# Altium footprint library Connector_SMD.PcbLib: 116 footprints (part 5 of 8)
Each footprint in its own frame and in the unit in brackets; x right, y up, seen from the top. Pads: shape width x height; smd on the part's side, far side on the other; paste and mask are expansions set on the pad; w line width, h text height; cw(c..) or ccw(c..) is an arc to the next point about the centre after c.
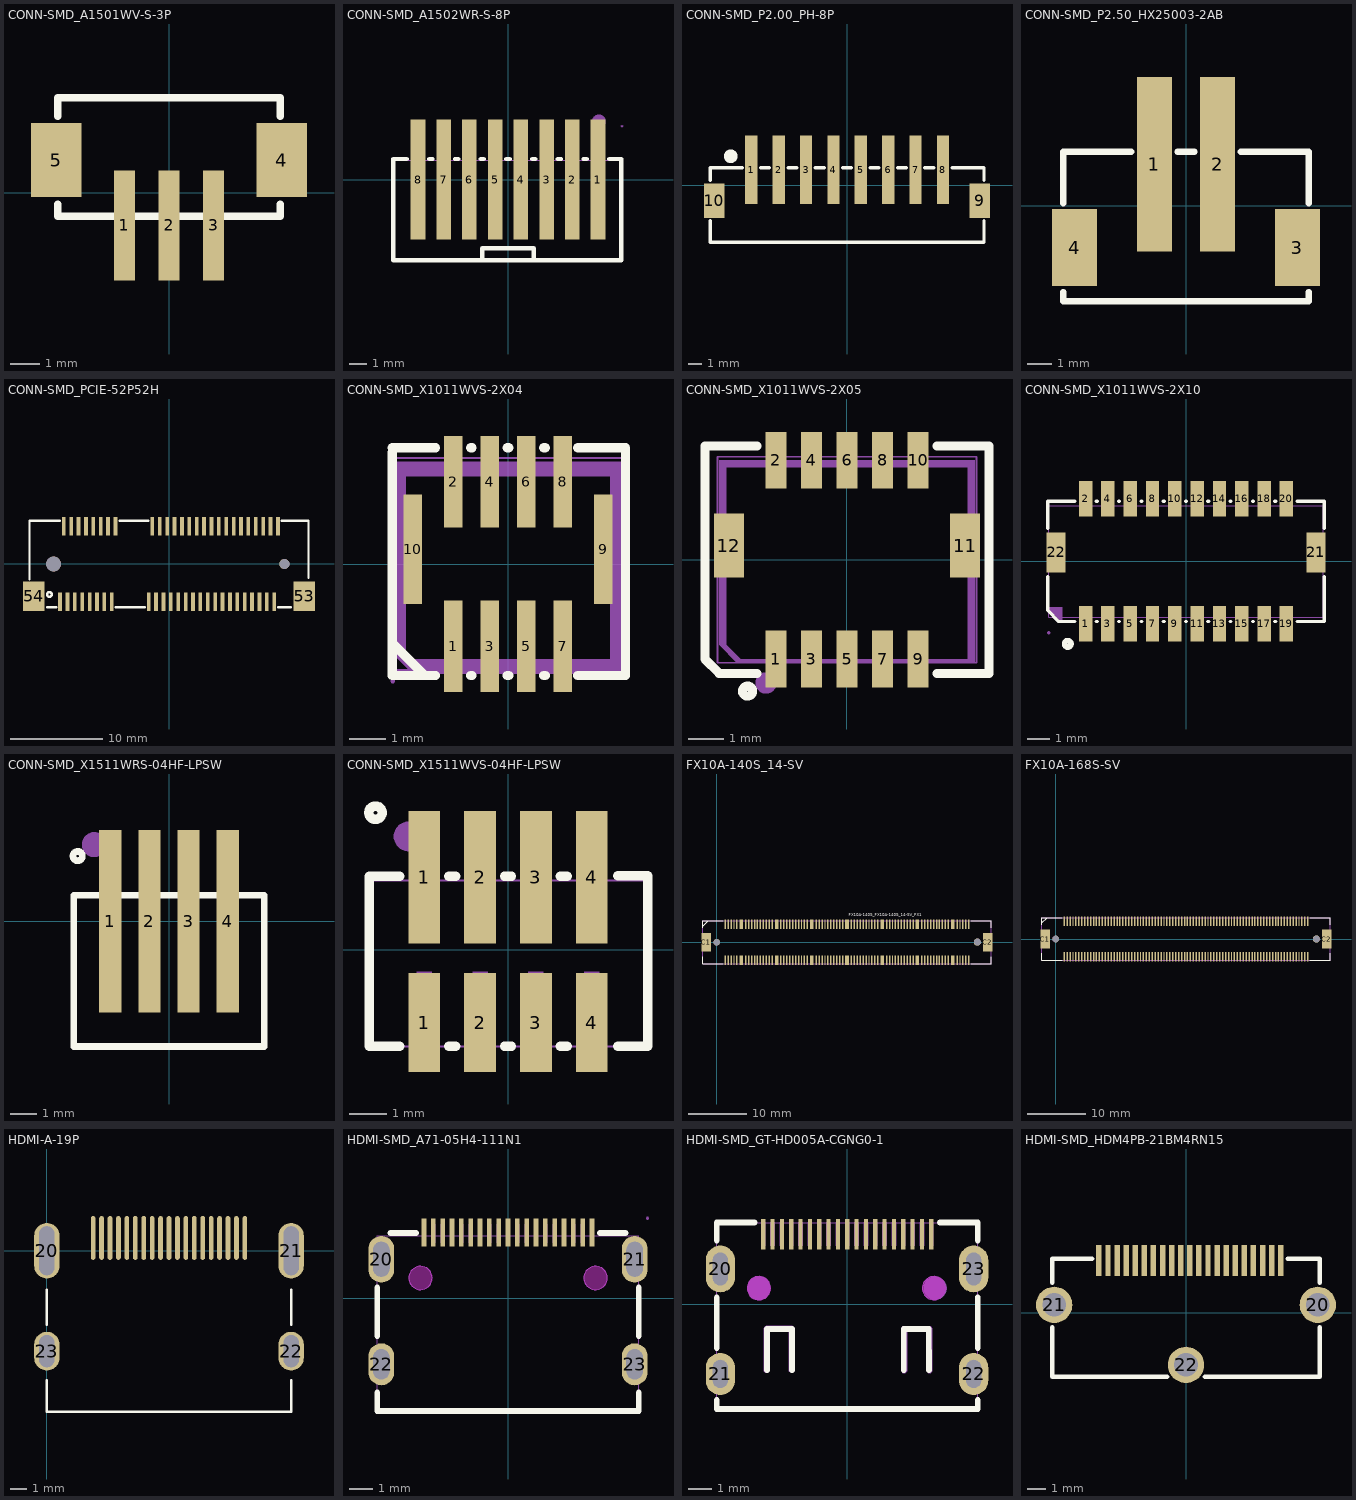
[diagram p4: the footprints below, top view; thin cyan lines are the x and y axes]

## CONN-SMD_A1501WV-S-3P [mm]
pads (5):
  rect 0.7x3.7 smd: 1(-1.5,-1.1) 2(0,-1.1) 3(1.5,-1.1)
  rect 1.7x2.5 smd: 4(3.8,1.1) 5(-3.8,1.1)
Top Overlay:
  lines w0.254: -3.75,-0.381 -3.75,-0.8 3.75,-0.8 3.75,-0.381 ; -3.75,2.581 -3.75,3.2 3.75,3.2 3.75,2.581
3D body "CN1.stp": height 5.05, standoff 0, extent -3.749,-2.198 3.75,3.001

## CONN-SMD_A1502WR-S-8P [mm]
pads (8):
  rect 0.85x7 smd paste+0 mask+0.051: 1(5.25,0) 2(3.75,0) 3(2.25,0) 4(0.75,0) 5(-0.75,0) 6(-2.25,0) 7(-3.75,0) 8(-5.25,0)
Top Overlay:
  lines w0.254: -6.7,1.1 -6.7,-4.7 6.6,-4.7 6.6,1.2 5.906,1.2 ; -6.7,1.2 -5.906,1.2 ; -4.594,1.2 -4.406,1.2 ; -3.094,1.2 -2.906,1.2 ; -1.594,1.2 -1.406,1.2 ; -1.5,-4.675 -1.5,-4 1.5,-4 1.5,-4.675 ; -0.094,1.2 0.094,1.2 ; 1.406,1.2 1.594,1.2 ; 2.906,1.2 3.094,1.2 ; 4.406,1.2 4.594,1.2
Mechanical 6:
  circle w0.4: c5.3,3.4 r0.2
Mechanical 15:
  region: 6.71,3.122 6.71,3.147 6.675,3.182 6.625,3.182 6.59,3.147 6.59,3.122 6.59,3.098 6.625,3.062 6.675,3.062 6.71,3.098 6.71,3.122
  region: -5.475,3.122 -5.025,3.122 -5.025,-2.878 -5.475,-2.878
  region: -3.975,3.122 -3.525,3.122 -3.525,-2.878 -3.975,-2.878
  region: -2.475,3.122 -2.025,3.122 -2.025,-2.878 -2.475,-2.878
  region: -0.975,3.122 -0.525,3.122 -0.525,-2.878 -0.975,-2.878
  region: 0.525,3.122 0.975,3.122 0.975,-2.878 0.525,-2.878
  region: 2.025,3.122 2.475,3.122 2.475,-2.878 2.025,-2.878
  region: 3.525,3.122 3.975,3.122 3.975,-2.878 3.525,-2.878
  region: 5.025,3.122 5.475,3.122 5.475,-2.878 5.025,-2.878
  lines w0.051: -6.65,-4.628 -6.65,1.122 6.65,1.122 6.65,-4.628 -6.65,-4.628
3D body "CN1.stp": height 4.46, standoff 0, extent -6.65,-4.625 6.65,3.125

## CONN-SMD_P2.00_PH-8P [mm]
pads (10):
  rect 0.9x5 smd: 1(-6.99,1.128) 2(-4.99,1.128) 3(-2.99,1.128) 4(-0.99,1.128) 5(1.01,1.128) 6(3.01,1.128) 7(5.01,1.128) 8(7.01,1.128)
  rect 1.5x2.5 smd: 9(9.71,-1.127) 10(-9.71,-1.127)
Top Overlay:
  circle w0.5: c-8.5,2.123 r0.25
  lines w0.254: -9.99,-2.604 -9.99,-4.167 9.98,-4.167 ; -9.99,0.354 -9.99,1.29 -7.671,1.29 ; -6.309,1.29 -5.671,1.29 ; -4.309,1.29 -3.671,1.29 ; -2.309,1.29 -1.671,1.29 ; -0.309,1.29 0.329,1.29 ; 1.691,1.29 2.329,1.29 ; 3.691,1.29 4.329,1.29 ; 5.691,1.29 6.329,1.29 ; 7.691,1.29 10.01,1.29 10.01,0.354 ; 10.01,-4.167 10.01,-2.604
Mechanical 15:
  circle w0.4: c-6.98,2.283 r0.2
3D body "CN1.stp": height 6.6, standoff 0, extent -10,-4.09 10,2.81

## CONN-SMD_P2.50_HX25003-2AB [mm]
pads (4):
  rect 1.4x7 smd: 1(-1.27,1.675) 2(1.27,1.675)
  rect 1.8x3.1 smd: 3(4.47,-1.675) 4(-4.47,-1.675)
Top Overlay:
  lines w0.254: -4.92,-3.825 4.92,-3.825 4.92,-3.456 ; -4.92,-3.782 -4.92,-3.456 ; -4.92,0.106 -4.92,2.175 -2.201,2.175 ; -0.339,2.175 0.339,2.175 ; 2.201,2.175 4.92,2.175 4.92,0.106

## CONN-SMD_PCIE-52P52H [mm]
pads (56):
  rect 0.4x2 smd: 1(-11.8,-4.1) 2(-11.4,4.1) 3(-11,-4.1) 4(-10.6,4.1) 5(-10.2,-4.1) 6(-9.8,4.1) 7(-9.4,-4.1) 8(-9,4.1) 9(-8.6,-4.1) 10(-8.2,4.1) 11(-7.8,-4.1) 12(-7.4,4.1) 13(-7,-4.1) 14(-6.6,4.1) 15(-6.2,-4.1) 16(-5.8,4.1) 17(-2.2,-4.1) 18(-1.8,4.1) 19(-1.4,-4.1) 20(-1,4.1) 21(-0.6,-4.1) 22(-0.2,4.1) 23(0.2,-4.1) 24(0.6,4.1) 25(1,-4.1) 26(1.4,4.1) 27(1.8,-4.1) 28(2.2,4.1) 29(2.6,-4.1) 30(3,4.1) 31(3.4,-4.1) 32(3.8,4.1) 33(4.2,-4.1) 34(4.6,4.1) 35(5,-4.1) 36(5.4,4.1) 37(5.8,-4.1) 38(6.2,4.1) 39(6.6,-4.1) 40(7,4.1) 41(7.4,-4.1) 42(7.8,4.1) 43(8.2,-4.1) 44(8.6,4.1) 45(9,-4.1) 46(9.4,4.1) 47(9.8,-4.1) 48(10.2,4.1) 49(10.6,-4.1) 50(11,4.1) 51(11.4,-4.1) 52(11.8,4.1)
  rect 2.3x3.2 smd: 53(14.65,-3.5) 54(-14.65,-3.5)
  round 1.6 hole 1.6 unplated: ""(-12.5,0)
  round 1.1 hole 1.1 unplated: ""(12.5,0)
Top Overlay:
  circle w0.254: c-12.954,-3.302 r0.254
  lines w0.254: -15.113,-1.651 -15.113,4.699 -11.831,4.699 ; -13.208,-4.699 -12.231,-4.699 ; -5.769,-4.699 -2.631,-4.699 ; -5.369,4.699 -2.231,4.699 ; 11.831,-4.699 13.208,-4.699 ; 12.231,4.699 15.113,4.699 15.113,-1.524

## CONN-SMD_X1011WVS-2X04 [mm]
pads (10):
  rect 0.5x2.5 smd paste+0 mask+0.051: 1(-1.5,-2.25) 2(-1.5,2.25) 3(-0.5,-2.25) 4(-0.5,2.25) 5(0.5,-2.25) 6(0.5,2.25) 7(1.5,-2.25) 8(1.5,2.25)
  rect 0.5x3 smd paste+0 mask+0.051: 9(2.6,0.4) 10(-2.6,0.4)
Top Overlay:
  lines w0.254: -3.16,-2.061 -3.16,-2.162 -2.274,-3.048 ; -3.16,3.048 -3.16,-3.048 -1.981,-3.048 ; -3.16,3.175 -1.981,3.175 ; -1.019,-3.048 -0.981,-3.048 ; -1.019,3.175 -0.981,3.175 ; -0.019,-3.048 0.019,-3.048 ; -0.019,3.175 0.019,3.175 ; 0.981,-3.048 1.019,-3.048 ; 0.981,3.175 1.019,3.175 ; 1.905,-3.048 3.211,-3.048 3.211,3.175 1.905,3.175
Mechanical 6:
  region: -3.2,-2.4 -3.2,2.8 -2.8,2.8 -2.8,-2.4
  region: -3.2,-2.4 -2.6,-3 -2.2,-3 -2.8,-2.4
  region: -2.8,2.8 3.2,2.8 3.2,2.4 -2.8,2.4
  region: 3.2,2.4 3.2,-3 2.8,-3 2.8,2.4
  region: 2.8,-3 -2.6,-3 -2.6,-2.6 2.8,-2.6
Mechanical 15:
  region: -3.09,-3.2 -3.09,-3.175 -3.125,-3.14 -3.175,-3.14 -3.21,-3.175 -3.21,-3.2 -3.21,-3.225 -3.175,-3.26 -3.125,-3.26 -3.09,-3.225 -3.09,-3.2
  region: -1.6,-1.7 -1.4,-1.7 -1.4,-3.2 -1.6,-3.2
  region: -1.6,3.2 -1.4,3.2 -1.4,1.7 -1.6,1.7
  region: -0.6,-1.7 -0.4,-1.7 -0.4,-3.2 -0.6,-3.2
  region: -0.6,3.2 -0.4,3.2 -0.4,1.7 -0.6,1.7
  region: 0.4,-1.7 0.6,-1.7 0.6,-3.2 0.4,-3.2
  region: 0.4,3.2 0.6,3.2 0.6,1.7 0.4,1.7
  region: 1.4,-1.7 1.6,-1.7 1.6,-3.2 1.4,-3.2
  region: 1.4,3.2 1.6,3.2 1.6,1.7 1.4,1.7
  region: -2.7,1.15 -2.5,1.15 -2.5,-0.35 -2.7,-0.35
  region: 2.5,1.15 2.7,1.15 2.7,-0.35 2.5,-0.35
  lines w0.051: -3.15,-2.9 -3.15,2.9 3.15,2.9 3.15,-2.9 -3.15,-2.9
3D body "CN2.stp": height 4.35, standoff 0, extent -3.15,-3.2 3.15,3.2

## CONN-SMD_X1011WVS-2X05 [mm]
pads (12):
  rect 0.6x1.6 smd paste+0 mask+0.051: 1(-2,-2.8) 2(-2,2.8) 3(-1,-2.8) 4(-1,2.8) 5(0,-2.8) 6(0,2.8) 7(1,-2.8) 8(1,2.8) 9(2,-2.8) 10(2,2.8)
  rect 0.85x1.8 smd paste+0 mask+0.051: 11(3.325,0.4) 12(-3.325,0.4)
Top Overlay:
  circle w0.254: c-2.8,-3.7 r0.141
  lines w0.254: -2.531,-3.2 -3.6,-3.2 -4,-2.8 -4,3.2 -2.531,3.2 ; 2.531,-3.2 4,-3.2 4,3.2 2.531,3.2
Mechanical 6:
  circle w0.3: c-2.282,-3.471 r0.15
  region: -3.4,2.8 3.4,2.8 3.4,2.6 -3.4,2.6
  region: 3.6,2.8 3.4,2.8 3.4,-2.4 3.6,-2.4
  region: -3.6,-2.4 -3.6,2.8 -3.4,2.8 -3.4,-2.4
  region: 3.6,-2.8 3.6,-2.4 3.4,-2.4 3.4,-2.8
  region: -3.2,-2.8 3.6,-2.8 3.6,-2.9 -3,-2.9 -3.1,-2.9
  region: -3.5,-2.4 -3.4,-2.4 -2.9,-2.9 -3,-2.9 -3.1,-2.9 -3.6,-2.4
Mechanical 15:
  region: 3.2,0.9 3.4,0.9 3.4,-0.1 3.2,-0.1
  region: -3.4,0.9 -3.2,0.9 -3.2,-0.1 -3.4,-0.1
  region: -2.1,-2.2 -1.9,-2.2 -1.9,-3.2 -2.1,-3.2
  region: -2.1,3.2 -1.9,3.2 -1.9,2.2 -2.1,2.2
  region: -1.1,-2.2 -0.9,-2.2 -0.9,-3.2 -1.1,-3.2
  region: -1.1,3.2 -0.9,3.2 -0.9,2.2 -1.1,2.2
  region: -0.1,-2.2 0.1,-2.2 0.1,-3.2 -0.1,-3.2
  region: -0.1,3.2 0.1,3.2 0.1,2.2 -0.1,2.2
  region: 0.9,-2.2 1.1,-2.2 1.1,-3.2 0.9,-3.2
  region: 0.9,3.2 1.1,3.2 1.1,2.2 0.9,2.2
  region: 1.9,-2.2 2.1,-2.2 2.1,-3.2 1.9,-3.2
  region: 1.9,3.2 2.1,3.2 2.1,2.2 1.9,2.2
  region: -3.59,-3.2 -3.59,-3.175 -3.625,-3.14 -3.675,-3.14 -3.71,-3.175 -3.71,-3.2 -3.71,-3.225 -3.675,-3.26 -3.625,-3.26 -3.59,-3.225 -3.59,-3.2
  lines w0.051: -3.65,-2.9 3.65,-2.9 3.65,2.9 -3.65,2.9 -3.65,-2.9
3D body "CN1.stp": height 4.35, standoff 0, extent -3.65,-3.2 3.65,3.2

## CONN-SMD_X1011WVS-2X10 [mm]
pads (22):
  rect 0.6x1.6 smd paste+0 mask+0.051: 1(-4.5,-2.8) 2(-4.5,2.8) 3(-3.5,-2.8) 4(-3.5,2.8) 5(-2.5,-2.8) 6(-2.5,2.8) 7(-1.5,-2.8) 8(-1.5,2.8) 9(-0.5,-2.8) 10(-0.5,2.8) 11(0.5,-2.8) 12(0.5,2.8) 13(1.5,-2.8) 14(1.5,2.8) 15(2.5,-2.8) 16(2.5,2.8) 17(3.5,-2.8) 18(3.5,2.8) 19(4.5,-2.8) 20(4.5,2.8)
  rect 0.85x1.8 smd paste+0 mask+0.051: 21(5.825,0.4) 22(-5.825,0.4)
Top Overlay:
  circle w0.254: c-5.3,-3.7 r0.141
  lines w0.152: -6.2,-0.68 -6.2,-2.2 -5.7,-2.7 -4.98,-2.7 ; -6.2,1.48 -6.2,2.7 -4.98,2.7 ; -4.02,-2.7 -3.98,-2.7 ; -4.02,2.7 -3.98,2.7 ; -3.02,-2.7 -2.98,-2.7 ; -3.02,2.7 -2.98,2.7 ; -2.02,-2.7 -1.98,-2.7 ; -2.02,2.7 -1.98,2.7 ; -1.02,-2.7 -0.98,-2.7 ; -1.02,2.7 -0.98,2.7 ; -0.02,-2.7 0.02,-2.7 ; -0.02,2.7 0.02,2.7 ; 0.98,-2.7 1.02,-2.7 ; 0.98,2.7 1.02,2.7 ; 1.98,-2.7 2.02,-2.7 ; 1.98,2.7 2.02,2.7 ; 2.98,-2.7 3.02,-2.7 ; 2.98,2.7 3.02,2.7 ; 3.98,-2.7 4.02,-2.7 ; 3.98,2.7 4.02,2.7 ; 4.98,-2.7 6.2,-2.7 6.2,-0.68 ; 4.98,2.7 6.2,2.7 6.2,1.48
Mechanical 6:
  region: -5.55,-2.75 -6.25,-2.05 -5.55,-2.05 -5.55,-2.75
Mechanical 15:
  region: -6.09,-3.2 -6.09,-3.175 -6.125,-3.14 -6.175,-3.14 -6.21,-3.175 -6.21,-3.2 -6.21,-3.225 -6.175,-3.26 -6.125,-3.26 -6.09,-3.225 -6.09,-3.2
  region: 4.4,3.2 4.6,3.2 4.6,2.2 4.4,2.2
  region: 4.4,-2.2 4.6,-2.2 4.6,-3.2 4.4,-3.2
  region: 3.4,3.2 3.6,3.2 3.6,2.2 3.4,2.2
  region: 3.4,-2.2 3.6,-2.2 3.6,-3.2 3.4,-3.2
  region: 2.4,3.2 2.6,3.2 2.6,2.2 2.4,2.2
  region: 2.4,-2.2 2.6,-2.2 2.6,-3.2 2.4,-3.2
  region: 1.4,3.2 1.6,3.2 1.6,2.2 1.4,2.2
  region: 1.4,-2.2 1.6,-2.2 1.6,-3.2 1.4,-3.2
  region: 0.4,3.2 0.6,3.2 0.6,2.2 0.4,2.2
  region: 0.4,-2.2 0.6,-2.2 0.6,-3.2 0.4,-3.2
  region: -0.6,3.2 -0.4,3.2 -0.4,2.2 -0.6,2.2
  region: -0.6,-2.2 -0.4,-2.2 -0.4,-3.2 -0.6,-3.2
  region: -1.6,3.2 -1.4,3.2 -1.4,2.2 -1.6,2.2
  region: -1.6,-2.2 -1.4,-2.2 -1.4,-3.2 -1.6,-3.2
  region: -2.6,3.2 -2.4,3.2 -2.4,2.2 -2.6,2.2
  region: -2.6,-2.2 -2.4,-2.2 -2.4,-3.2 -2.6,-3.2
  region: -3.6,3.2 -3.4,3.2 -3.4,2.2 -3.6,2.2
  region: -3.6,-2.2 -3.4,-2.2 -3.4,-3.2 -3.6,-3.2
  region: -4.6,3.2 -4.4,3.2 -4.4,2.2 -4.6,2.2
  region: -4.6,-2.2 -4.4,-2.2 -4.4,-3.2 -4.6,-3.2
  region: 5.725,1.1 5.925,1.1 5.925,-0.3 5.725,-0.3
  region: -5.925,1.1 -5.725,1.1 -5.725,-0.3 -5.925,-0.3
  lines w0.051: -6.15,-2.5 6.15,-2.5 6.15,2.5 -6.15,2.5 -6.15,-2.5
3D body "CN1.stp": height 4.35, standoff 0, extent -6.15,-3.2 6.15,3.2

## CONN-SMD_X1511WRS-04HF-LPSW [mm]
pads (4):
  rect 0.85x7 smd: 1(-2.25,0) 2(-0.75,0) 3(0.75,0) 4(2.25,0)
Top Overlay:
  circle w0.254: c-3.5,2.5 r0.18
  lines w0.254: -3.65,-4.8 -3.65,1 3.65,1 3.65,-4.8 -3.65,-4.8
Mechanical 6:
  circle w0.48: c-2.865,2.936 r0.24
Mechanical 15:
  region: -3.59,-4.8 -3.59,-4.825 -3.625,-4.86 -3.675,-4.86 -3.71,-4.825 -3.71,-4.8 -3.71,-4.775 -3.675,-4.74 -3.625,-4.74 -3.59,-4.775 -3.59,-4.8
  region: -0.95,2.957 -0.55,2.957 -0.55,-2.043 -0.95,-2.043
  region: -2.45,2.957 -2.05,2.957 -2.05,-2.043 -2.45,-2.043
  region: 0.55,2.957 0.95,2.957 0.95,-2.043 0.55,-2.043
  region: 2.05,2.957 2.45,2.957 2.45,-2.043 2.05,-2.043
  lines w0.051: -3.65,-4.8 -3.65,0.95 3.65,0.95 3.65,-4.8 -3.65,-4.8
3D body "未命名-EasyEDA PCB Model~1BWoCN1~CONN-SMD_4P-P1.50_L5.8-W7.3~CONN-SMD_MX1.50-WS-4P~1BWo.step": height 4.46, standoff 0, extent -3.65,-4.777 3.65,2.973

## CONN-SMD_X1511WVS-04HF-LPSW [mm]
pads (8):
  rect 0.85x3.55 smd: 1(-2.25,1.95) 2(-0.75,1.95) 3(0.75,1.95) 4(2.25,1.95)
  rect 0.85x2.65 smd: 1(-2.25,-1.95) 2(-0.75,-1.95) 3(0.75,-1.95) 4(2.25,-1.95)
Top Overlay:
  circle w0.254: c-3.556,3.683 r0.18
  lines w0.254: -2.906,-2.59 -3.719,-2.59 -3.719,1.982 -2.906,1.982 ; -1.594,-2.59 -1.406,-2.59 ; -1.594,1.982 -1.406,1.982 ; -0.094,-2.59 0.094,-2.59 ; -0.094,1.982 0.094,1.982 ; 1.406,-2.59 1.594,-2.59 ; 1.406,1.982 1.594,1.982 ; 2.94,-2.585 3.753,-2.585 3.753,1.987 2.94,1.987
Mechanical 6:
  circle w0.4: c-2.667,3.048 r0.2
Mechanical 15:
  region: -3.59,-2.59 -3.59,-2.615 -3.625,-2.65 -3.675,-2.65 -3.71,-2.615 -3.71,-2.59 -3.71,-2.565 -3.675,-2.53 -3.625,-2.53 -3.59,-2.565 -3.59,-2.59
  region: -2.45,3.46 -2.05,3.46 -2.05,1.46 -2.45,1.46
  region: -0.95,3.46 -0.55,3.46 -0.55,1.46 -0.95,1.46
  region: 0.55,3.46 0.95,3.46 0.95,1.46 0.55,1.46
  region: 2.05,3.46 2.45,3.46 2.45,1.46 2.05,1.46
  region: 2.05,-0.59 2.45,-0.59 2.45,-2.59 2.05,-2.59
  region: 0.55,-0.59 0.95,-0.59 0.95,-2.59 0.55,-2.59
  region: -0.95,-0.59 -0.55,-0.59 -0.55,-2.59 -0.95,-2.59
  region: -2.45,-0.59 -2.05,-0.59 -2.05,-2.59 -2.45,-2.59
  lines w0.051: -3.65,-2.59 -3.65,1.86 3.65,1.86 3.65,-2.59 -3.65,-2.59
3D body "未命名-EasyEDA PCB Model~uQ5sCN1~CONN-SMD_X1511WVS-04HF-LPSW~CONN-SMD_X1511WVS-04HF-LPSW~uQ5s.step": height 5.77, standoff 0, extent -3.65,-2.625 3.65,3.425

## FX10A-140S_14-SV [mm] "FX10A-140S_14-SV"
pads (158):
  round 1.118 hole 1.118: " "(0,0)
  round 1.219 hole 1.219: " "(44.4,0)
  rect 0.25x1.6 smd: A1(1.45,-3.05) A2(1.95,-3.05) A3(2.45,-3.05) A4(2.95,-3.05) A5(3.45,-3.05) A7(4.95,-3.05) A8(5.45,-3.05) A9(5.95,-3.05) A10(6.45,-3.05) A11(6.95,-3.05) A12(7.45,-3.05) A13(7.95,-3.05) A14(8.45,-3.05) A15(8.95,-3.05) A16(9.45,-3.05) A18(10.95,-3.05) A19(11.45,-3.05) A20(11.95,-3.05) A21(12.45,-3.05) A22(12.95,-3.05) A23(13.45,-3.05) A24(13.95,-3.05) A25(14.45,-3.05) A26(14.95,-3.05) A27(15.45,-3.05) A29(16.95,-3.05) A30(17.45,-3.05) A31(17.95,-3.05) A32(18.45,-3.05) A33(18.95,-3.05) A34(19.45,-3.05) A35(19.95,-3.05) A36(20.45,-3.05) A37(20.95,-3.05) A38(21.45,-3.05) A40(22.95,-3.05) A41(23.45,-3.05) A42(23.95,-3.05) A43(24.45,-3.05) A44(24.95,-3.05) A45(25.45,-3.05) A46(25.95,-3.05) A47(26.45,-3.05) A48(26.95,-3.05) A49(27.45,-3.05) A51(28.95,-3.05) A52(29.45,-3.05) A53(29.95,-3.05) A54(30.45,-3.05) A55(30.95,-3.05) A56(31.45,-3.05) A57(31.95,-3.05) A58(32.45,-3.05) A59(32.95,-3.05) A60(33.45,-3.05) A62(34.95,-3.05) A63(35.45,-3.05) A64(35.95,-3.05) A65(36.45,-3.05) A66(36.95,-3.05) A67(37.45,-3.05) A68(37.95,-3.05) A69(38.45,-3.05) A70(38.95,-3.05) A71(39.45,-3.05) A73(40.95,-3.05) A74(41.45,-3.05) A75(41.95,-3.05) A76(42.45,-3.05) A77(42.95,-3.05) B1(1.45,3.05) B2(1.95,3.05) B3(2.45,3.05) B4(2.95,3.05) B5(3.45,3.05) B7(4.95,3.05) B8(5.45,3.05) B9(5.95,3.05) B10(6.45,3.05) B11(6.95,3.05) B12(7.45,3.05) B13(7.95,3.05) B14(8.45,3.05) B15(8.95,3.05) B16(9.45,3.05) B18(10.95,3.05) B19(11.45,3.05) B20(11.95,3.05) B21(12.45,3.05) B22(12.95,3.05) B23(13.45,3.05) B24(13.95,3.05) B25(14.45,3.05) B26(14.95,3.05) B27(15.45,3.05) B29(16.95,3.05) B30(17.45,3.05) B31(17.95,3.05) B32(18.45,3.05) B33(18.95,3.05) B34(19.45,3.05) B35(19.95,3.05) B36(20.45,3.05) B37(20.95,3.05) B38(21.45,3.05) B40(22.95,3.05) B41(23.45,3.05) B42(23.95,3.05) B43(24.45,3.05) B44(24.95,3.05) B45(25.45,3.05) B46(25.95,3.05) B47(26.45,3.05) B48(26.95,3.05) B49(27.45,3.05) B51(28.95,3.05) B52(29.45,3.05) B53(29.95,3.05) B54(30.45,3.05) B55(30.95,3.05) B56(31.45,3.05) B57(31.95,3.05) B58(32.45,3.05) B59(32.95,3.05) B60(33.45,3.05) B62(34.95,3.05) B63(35.45,3.05) B64(35.95,3.05) B65(36.45,3.05) B66(36.95,3.05) B67(37.45,3.05) B68(37.95,3.05) B69(38.45,3.05) B70(38.95,3.05) B71(39.45,3.05) B73(40.95,3.05) B74(41.45,3.05) B75(41.95,3.05) B76(42.45,3.05) B77(42.95,3.05)
  rect 0.6x1.6 smd: A6(4.2,-3.05) A17(10.2,-3.05) A28(16.2,-3.05) A39(22.2,-3.05) A50(28.2,-3.05) A61(34.2,-3.05) A72(40.2,-3.05) B6(4.2,3.05) B17(10.2,3.05) B28(16.2,3.05) B39(22.2,3.05) B50(28.2,3.05) B61(34.2,3.05) B72(40.2,3.05)
  rect 1.6x3.2 smd: C1(-1.75,0) C2(46.15,0)
Top Overlay:
  lines w0.1: -2.35,-2.45 -2.35,-3.65 1.15,-3.65 ; -2.35,2.45 -2.35,3.65 1.15,3.65 ; 43.25,-3.65 46.75,-3.65 46.75,-2.45 ; 43.25,3.65 46.75,3.65 46.75,2.45
  lines w0.15: -2.286,2.794 -1.524,3.556
  text "FX10A-140S_FX10A-140S_14-SV_FX1" at 22.508,4.43 h0.5
Mechanical 7:
  text "A20" at 12.13,-3.25 h0.15
  text "A19" at 11.63,-3.25 h0.15
  text "B25" at 14.63,2.85 h0.15
  text "A76" at 42.63,-3.25 h0.15
  text "A77" at 43.13,-3.25 h0.15
  text "B73" at 41.13,2.85 h0.15
  text "B74" at 41.63,2.85 h0.15
  text "A74" at 41.63,-3.25 h0.15
  text "A73" at 41.13,-3.25 h0.15
  text "B69" at 38.63,2.85 h0.15
  text "B70" at 39.13,2.85 h0.15
  text "A70" at 39.13,-3.25 h0.15
  text "A69" at 38.63,-3.25 h0.15
  text "B1" at 1.57,2.85 h0.15
  text "A23" at 13.63,-3.25 h0.15
  text "B2" at 2.07,2.85 h0.15
  text "A22" at 13.13,-3.25 h0.15
  text "B19" at 11.63,2.85 h0.15
  text "B20" at 12.13,2.85 h0.15
  text "B22" at 13.13,2.85 h0.15
  text "B23" at 13.63,2.85 h0.15
  text "A31" at 18.13,-3.25 h0.15
  text "B31" at 18.13,2.85 h0.15
  text "A25" at 14.63,-3.25 h0.15
  text "B26" at 15.13,2.85 h0.15
  text "A26" at 15.13,-3.25 h0.15
  text "B30" at 17.63,2.85 h0.15
  text "A30" at 17.63,-3.25 h0.15
  text "A55" at 31.13,-3.25 h0.15
  text "A56" at 31.63,-3.25 h0.15
  text "A58" at 32.63,-3.25 h0.15
  text "A59" at 33.13,-3.25 h0.15
  text "B33" at 19.13,2.85 h0.15
  text "B34" at 19.63,2.85 h0.15
  text "B36" at 20.63,2.85 h0.15
  text "B37" at 21.13,2.85 h0.15
  text "B41" at 23.63,2.85 h0.15
  text "B42" at 24.13,2.85 h0.15
  text "B44" at 25.13,2.85 h0.15
  text "B45" at 25.63,2.85 h0.15
  text "B47" at 26.63,2.85 h0.15
  text "B48" at 27.13,2.85 h0.15
  text "B52" at 29.63,2.85 h0.15
  text "B53" at 30.13,2.85 h0.15
  text "B55" at 31.13,2.85 h0.15
  text "B56" at 31.63,2.85 h0.15
  text "B58" at 32.63,2.85 h0.15
  text "B59" at 33.13,2.85 h0.15
  text "A3" at 2.57,-3.25 h0.15
  text "A7" at 5.07,-3.25 h0.15
  text "A10" at 6.63,-3.25 h0.15
  text "A13" at 8.13,-3.25 h0.15
  text "A16" at 9.63,-3.25 h0.15
  text "A18" at 11.13,-3.25 h0.15
  text "A21" at 12.63,-3.25 h0.15
  text "A24" at 14.13,-3.25 h0.15
  text "A27" at 15.63,-3.25 h0.15
  text "A29" at 17.13,-3.25 h0.15
  text "A32" at 18.63,-3.25 h0.15
  text "A35" at 20.13,-3.25 h0.15
  text "A38" at 21.63,-3.25 h0.15
  text "A40" at 23.13,-3.25 h0.15
  text "A43" at 24.63,-3.25 h0.15
  text "A46" at 26.13,-3.25 h0.15
  text "A49" at 27.63,-3.25 h0.15
  text "A51" at 29.13,-3.25 h0.15
  text "A54" at 30.63,-3.25 h0.15
  text "A57" at 32.13,-3.25 h0.15
  text "A60" at 33.63,-3.25 h0.15
  text "A62" at 35.13,-3.25 h0.15
  text "A65" at 36.63,-3.25 h0.15
  text "A68" at 38.13,-3.25 h0.15
  text "A71" at 39.63,-3.25 h0.15
  text "A75" at 42.13,-3.25 h0.15
  text "B75" at 42.13,2.85 h0.15
  text "B71" at 39.63,2.85 h0.15
  text "B68" at 38.13,2.85 h0.15
  text "B65" at 36.63,2.85 h0.15
  text "B62" at 35.13,2.85 h0.15
  text "B60" at 33.63,2.85 h0.15
  text "B57" at 32.13,2.85 h0.15
  text "B54" at 30.63,2.85 h0.15
  text "B51" at 29.13,2.85 h0.15
  text "B49" at 27.63,2.85 h0.15
  text "B46" at 26.13,2.85 h0.15
  text "B43" at 24.63,2.85 h0.15
  text "B40" at 23.13,2.85 h0.15
  text "B38" at 21.63,2.85 h0.15
  text "B35" at 20.13,2.85 h0.15
  text "B32" at 18.63,2.85 h0.15
  text "B29" at 17.13,2.85 h0.15
  text "B27" at 15.63,2.85 h0.15
  text "B24" at 14.13,2.85 h0.15
  text "B21" at 12.63,2.85 h0.15
  text "B18" at 11.13,2.85 h0.15
  text "B16" at 9.63,2.85 h0.15
  text "B13" at 8.13,2.85 h0.15
  text "B10" at 6.63,2.85 h0.15
  text "B7" at 5.07,2.85 h0.15
  text "B3" at 2.57,2.85 h0.15
  text "A61" at 34.38,-3.25 h0.15
  text "A50" at 28.38,-3.25 h0.15
  text "A39" at 22.38,-3.25 h0.15
  text "A28" at 16.38,-3.25 h0.15
  text "A17" at 10.38,-3.25 h0.15
  text "A6" at 4.32,-3.25 h0.15
  text "B6" at 4.32,2.85 h0.15
  text "B17" at 10.38,2.85 h0.15
  text "B28" at 16.38,2.85 h0.15
  text "B39" at 22.38,2.85 h0.15
  text "B50" at 28.38,2.85 h0.15
  text "B61" at 34.38,2.85 h0.15
  text "B72" at 40.38,2.85 h0.15
  text "A72" at 40.38,-3.25 h0.15
  text "C2" at 46.55,-0.2 h0.5
  text "C1" at -1.35,-0.2 h0.5
  text "B15" at 9.13,2.85 h0.15
  text "B14" at 8.63,2.85 h0.15
  text "B12" at 7.63,2.85 h0.15
  text "B11" at 7.13,2.85 h0.15
  text "B9" at 6.07,2.85 h0.15
  text "B8" at 5.57,2.85 h0.15
  text "B5" at 3.57,2.85 h0.15
  text "B4" at 3.07,2.85 h0.15
  text "A1" at 1.57,-3.25 h0.15
  text "A2" at 2.07,-3.25 h0.15
  text "A4" at 3.07,-3.25 h0.15
  text "A5" at 3.57,-3.25 h0.15
  text "A8" at 5.57,-3.25 h0.15
  text "A9" at 6.07,-3.25 h0.15
  text "A11" at 7.13,-3.25 h0.15
  text "A12" at 7.63,-3.25 h0.15
  text "A14" at 8.63,-3.25 h0.15
  text "A15" at 9.13,-3.25 h0.15
  text "B76" at 42.63,2.85 h0.15
  text "B66" at 37.13,2.85 h0.15
  text "B67" at 37.63,2.85 h0.15
  text "A67" at 37.63,-3.25 h0.15
  text "A66" at 37.13,-3.25 h0.15
  text "B64" at 36.13,2.85 h0.15
  text "B63" at 35.63,2.85 h0.15
  text "A64" at 36.13,-3.25 h0.15
  text "A63" at 35.63,-3.25 h0.15
  text "B77" at 43.13,2.85 h0.15
  text "A33" at 19.13,-3.25 h0.15
  text "A34" at 19.63,-3.25 h0.15
  text "A36" at 20.63,-3.25 h0.15
  text "A37" at 21.13,-3.25 h0.15
  text "A41" at 23.63,-3.25 h0.15
  text "A42" at 24.13,-3.25 h0.15
  text "A44" at 25.13,-3.25 h0.15
  text "A45" at 25.63,-3.25 h0.15
  text "A47" at 26.63,-3.25 h0.15
  text "A48" at 27.13,-3.25 h0.15
  text "A52" at 29.63,-3.25 h0.15
  text "A53" at 30.13,-3.25 h0.15
Mechanical 9:
  lines w0.025: -2.35,-3.65 46.75,-3.65 46.75,3.65 -2.35,3.65 -2.35,-3.65
3D body "FX10A-140S14-SV.stp": height 3.2, standoff -0.6, extent -2.35,-3.65 46.75,3.65

## FX10A-168S-SV [mm] "FX10A-168S-SV"
pads (172):
  round 1.118 hole 1.118: " "(0,0)
  round 1.219 hole 1.219: " "(44.4,0)
  rect 0.25x1.6 smd: A1(1.45,-3.05) A2(1.95,-3.05) A3(2.45,-3.05) A4(2.95,-3.05) A5(3.45,-3.05) A6(3.95,-3.05) A7(4.45,-3.05) A8(4.95,-3.05) A9(5.45,-3.05) A10(5.95,-3.05) A11(6.45,-3.05) A12(6.95,-3.05) A13(7.45,-3.05) A14(7.95,-3.05) A15(8.45,-3.05) A16(8.95,-3.05) A17(9.45,-3.05) A18(9.95,-3.05) A19(10.45,-3.05) A20(10.95,-3.05) A21(11.45,-3.05) A22(11.95,-3.05) A23(12.45,-3.05) A24(12.95,-3.05) A25(13.45,-3.05) A26(13.95,-3.05) A27(14.45,-3.05) A28(14.95,-3.05) A29(15.45,-3.05) A30(15.95,-3.05) A31(16.45,-3.05) A32(16.95,-3.05) A33(17.45,-3.05) A34(17.95,-3.05) A35(18.45,-3.05) A36(18.95,-3.05) A37(19.45,-3.05) A38(19.95,-3.05) A39(20.45,-3.05) A40(20.95,-3.05) A41(21.45,-3.05) A42(21.95,-3.05) A43(22.45,-3.05) A44(22.95,-3.05) A45(23.45,-3.05) A46(23.95,-3.05) A47(24.45,-3.05) A48(24.95,-3.05) A49(25.45,-3.05) A50(25.95,-3.05) A51(26.45,-3.05) A52(26.95,-3.05) A53(27.45,-3.05) A54(27.95,-3.05) A55(28.45,-3.05) A56(28.95,-3.05) A57(29.45,-3.05) A58(29.95,-3.05) A59(30.45,-3.05) A60(30.95,-3.05) A61(31.45,-3.05) A62(31.95,-3.05) A63(32.45,-3.05) A64(32.95,-3.05) A65(33.45,-3.05) A66(33.95,-3.05) A67(34.45,-3.05) A68(34.95,-3.05) A69(35.45,-3.05) A70(35.95,-3.05) A71(36.45,-3.05) A72(36.95,-3.05) A73(37.45,-3.05) A74(37.95,-3.05) A75(38.45,-3.05) A76(38.95,-3.05) A77(39.45,-3.05) A78(39.95,-3.05) A79(40.45,-3.05) A80(40.95,-3.05) A81(41.45,-3.05) A82(41.95,-3.05) A83(42.45,-3.05) A84(42.95,-3.05) B1(1.45,3.05) B2(1.95,3.05) B3(2.45,3.05) B4(2.95,3.05) B5(3.45,3.05) B6(3.95,3.05) B7(4.45,3.05) B8(4.95,3.05) B9(5.45,3.05) B10(5.95,3.05) B11(6.45,3.05) B12(6.95,3.05) B13(7.45,3.05) B14(7.95,3.05) B15(8.45,3.05) B16(8.95,3.05) B17(9.45,3.05) B18(9.95,3.05) B19(10.45,3.05) B20(10.95,3.05) B21(11.45,3.05) B22(11.95,3.05) B23(12.45,3.05) B24(12.95,3.05) B25(13.45,3.05) B26(13.95,3.05) B27(14.45,3.05) B28(14.95,3.05) B29(15.45,3.05) B30(15.95,3.05) B31(16.45,3.05) B32(16.95,3.05) B33(17.45,3.05) B34(17.95,3.05) B35(18.45,3.05) B36(18.95,3.05) B37(19.45,3.05) B38(19.95,3.05) B39(20.45,3.05) B40(20.95,3.05) B41(21.45,3.05) B42(21.95,3.05) B43(22.45,3.05) B44(22.95,3.05) B45(23.45,3.05) B46(23.95,3.05) B47(24.45,3.05) B48(24.95,3.05) B49(25.45,3.05) B50(25.95,3.05) B51(26.45,3.05) B52(26.95,3.05) B53(27.45,3.05) B54(27.95,3.05) B55(28.45,3.05) B56(28.95,3.05) B57(29.45,3.05) B58(29.95,3.05) B59(30.45,3.05) B60(30.95,3.05) B61(31.45,3.05) B62(31.95,3.05) B63(32.45,3.05) B64(32.95,3.05) B65(33.45,3.05) B66(33.95,3.05) B67(34.45,3.05) B68(34.95,3.05) B69(35.45,3.05) B70(35.95,3.05) B71(36.45,3.05) B72(36.95,3.05) B73(37.45,3.05) B74(37.95,3.05) B75(38.45,3.05) B76(38.95,3.05) B77(39.45,3.05) B78(39.95,3.05) B79(40.45,3.05) B80(40.95,3.05) B81(41.45,3.05) B82(41.95,3.05) B83(42.45,3.05) B84(42.95,3.05)
  rect 1.6x3.2 smd: C1(-1.75,0) C2(46.15,0)
Top Overlay:
  lines w0.1: -2.35,-2.45 -2.35,-3.65 1.15,-3.65 ; -2.35,2.45 -2.35,3.65 1.15,3.65 ; -2.35,2.75 -1.45,3.65 ; 43.25,-3.65 46.75,-3.65 46.75,-2.45 ; 43.25,3.65 46.75,3.65 46.75,2.45
Mechanical 7:
  text "B24" at 12.95,3.29 h0.2
  text "B25" at 13.45,3.29 h0.2
  text "B26" at 13.95,3.29 h0.2
  text "B27" at 14.45,3.29 h0.2
  text "A4" at 2.974,-2.89 h0.2
  text "A5" at 3.482,-2.89 h0.2
  text "A7" at 4.45,-2.89 h0.2
  text "A29" at 15.45,-2.81 h0.2
  text "A9" at 5.45,-2.89 h0.2
  text "A10" at 5.95,-2.81 h0.2
  text "A11" at 6.45,-2.81 h0.2
  text "A12" at 6.95,-2.81 h0.2
  text "A14" at 7.95,-2.81 h0.2
  text "A15" at 8.45,-2.81 h0.2
  text "A30" at 15.95,-2.81 h0.2
  text "A24" at 12.95,-2.81 h0.2
  text "A31" at 16.45,-2.81 h0.2
  text "B31" at 16.45,3.29 h0.2
  text "B32" at 16.95,3.29 h0.2
  text "A16" at 8.95,-2.81 h0.2
  text "A17" at 9.45,-2.81 h0.2
  text "A19" at 10.45,-2.81 h0.2
  text "A20" at 10.95,-2.81 h0.2
  text "A25" at 13.45,-2.81 h0.2
  text "A32" at 16.95,-2.81 h0.2
  text "A79" at 40.45,-2.81 h0.2
  text "A80" at 40.95,-2.81 h0.2
  text "A26" at 13.95,-2.81 h0.2
  text "A1" at 1.45,-2.89 h0.2
  text "A2" at 1.958,-2.89 h0.2
  text "B42" at 21.95,3.29 h0.2
  text "B45" at 23.45,3.29 h0.2
  text "B46" at 23.95,3.29 h0.2
  text "B47" at 24.45,3.29 h0.2
  text "B49" at 25.45,3.29 h0.2
  text "B50" at 25.95,3.29 h0.2
  text "C1" at -1.75,-0.04 h0.2
  text "C2" at 46.15,-0.04 h0.2
  text "A8" at 4.95,-2.89 h0.2
  text "B8" at 4.95,3.21 h0.2
  text "B13" at 7.45,3.29 h0.2
  text "A13" at 7.45,-2.81 h0.2
  text "A18" at 9.95,-2.81 h0.2
  text "B18" at 9.95,3.29 h0.2
  text "B23" at 12.45,3.29 h0.2
  text "A23" at 12.45,-2.81 h0.2
  text "A28" at 14.95,-2.81 h0.2
  text "B28" at 14.95,3.29 h0.2
  text "A33" at 17.45,-2.81 h0.2
  text "B33" at 17.45,3.29 h0.2
  text "B38" at 19.95,3.29 h0.2
  text "A38" at 19.95,-2.81 h0.2
  text "A43" at 22.45,-2.81 h0.2
  text "B43" at 22.45,3.29 h0.2
  text "B48" at 24.95,3.29 h0.2
  text "A48" at 24.95,-2.81 h0.2
  text "A53" at 27.45,-2.81 h0.2
  text "B53" at 27.45,3.29 h0.2
  text "B58" at 29.95,3.29 h0.2
  text "A58" at 29.95,-2.81 h0.2
  text "A63" at 32.45,-2.81 h0.2
  text "B63" at 32.45,3.29 h0.2
  text "A68" at 34.95,-2.81 h0.2
  text "B68" at 34.95,3.29 h0.2
  text "A78" at 39.95,-2.81 h0.2
  text "A73" at 37.45,-2.81 h0.2
  text "B73" at 37.45,3.29 h0.2
  text "B78" at 39.95,3.29 h0.2
  text "B81" at 41.45,3.29 h0.2
  text "A81" at 41.45,-2.81 h0.2
  text "A84" at 42.95,-2.81 h0.2
  text "B84" at 42.95,3.29 h0.2
  text "B3" at 2.466,3.206 h0.2
  text "A3" at 2.466,-2.89 h0.2
  text "B34" at 17.95,3.29 h0.2
  text "B35" at 18.45,3.29 h0.2
  text "B36" at 18.95,3.29 h0.2
  text "B37" at 19.45,3.29 h0.2
  text "A54" at 27.95,-2.81 h0.2
  text "A55" at 28.45,-2.81 h0.2
  text "B39" at 20.45,3.29 h0.2
  text "B40" at 20.95,3.29 h0.2
  text "B55" at 28.45,3.29 h0.2
  text "A59" at 30.45,-2.81 h0.2
  text "B56" at 28.95,3.29 h0.2
  text "B57" at 29.45,3.29 h0.2
  text "B59" at 30.45,3.29 h0.2
  text "B60" at 30.95,3.29 h0.2
  text "B61" at 31.45,3.29 h0.2
  text "B62" at 31.95,3.29 h0.2
  text "A34" at 17.95,-2.81 h0.2
  text "A35" at 18.45,-2.81 h0.2
  text "A36" at 18.95,-2.81 h0.2
  text "A37" at 19.45,-2.81 h0.2
  text "A39" at 20.45,-2.81 h0.2
  text "A40" at 20.95,-2.81 h0.2
  text "A41" at 21.45,-2.81 h0.2
  text "A42" at 21.95,-2.81 h0.2
  text "A44" at 22.95,-2.81 h0.2
  text "A45" at 23.45,-2.81 h0.2
  text "A6" at 3.95,-2.89 h0.2
  text "A46" at 23.95,-2.81 h0.2
  text "A47" at 24.45,-2.81 h0.2
  text "A49" at 25.45,-2.81 h0.2
  text "A50" at 25.95,-2.81 h0.2
  text "A77" at 39.45,-2.81 h0.2
  text "A51" at 26.45,-2.81 h0.2
  text "A52" at 26.95,-2.81 h0.2
  text "A56" at 28.95,-2.81 h0.2
  text "A57" at 29.45,-2.81 h0.2
  text "A60" at 30.95,-2.81 h0.2
  text "B41" at 21.45,3.29 h0.2
  text "A61" at 31.45,-2.81 h0.2
  text "A62" at 31.95,-2.81 h0.2
  text "B51" at 26.45,3.29 h0.2
  text "B52" at 26.95,3.29 h0.2
  text "B76" at 38.95,3.29 h0.2
  text "B75" at 38.45,3.29 h0.2
  text "B74" at 37.95,3.29 h0.2
  text "B72" at 36.95,3.29 h0.2
  text "B77" at 39.45,3.29 h0.2
  text "B71" at 36.45,3.29 h0.2
  text "B67" at 34.45,3.29 h0.2
  text "B66" at 33.95,3.29 h0.2
  text "B65" at 33.45,3.29 h0.2
  text "B64" at 32.95,3.29 h0.2
  text "B69" at 35.45,3.29 h0.2
  text "B70" at 35.95,3.29 h0.2
  text "B2" at 1.958,3.206 h0.2
  text "B4" at 2.974,3.206 h0.2
  text "B79" at 40.45,3.29 h0.2
  text "B1" at 1.45,3.206 h0.2
  text "B54" at 27.95,3.29 h0.2
  text "B44" at 22.95,3.29 h0.2
  text "B5" at 3.482,3.206 h0.2
  text "A65" at 33.45,-2.81 h0.2
  text "B6" at 3.95,3.21 h0.2
  text "A66" at 33.95,-2.81 h0.2
  text "B7" at 4.45,3.21 h0.2
  text "A67" at 34.45,-2.81 h0.2
  text "A21" at 11.45,-2.81 h0.2
  text "A69" at 35.45,-2.81 h0.2
  text "A22" at 11.95,-2.81 h0.2
  text "A64" at 32.95,-2.81 h0.2
  text "B14" at 7.95,3.29 h0.2
  text "B15" at 8.45,3.29 h0.2
  text "A72" at 36.95,-2.81 h0.2
  text "B16" at 8.95,3.29 h0.2
  text "A74" at 37.95,-2.81 h0.2
  text "B17" at 9.45,3.29 h0.2
  text "A75" at 38.45,-2.81 h0.2
  text "A27" at 14.45,-2.81 h0.2
  text "A76" at 38.95,-2.81 h0.2
  text "B9" at 5.45,3.21 h0.2
  text "A71" at 36.45,-2.81 h0.2
  text "B10" at 5.95,3.29 h0.2
  text "A70" at 35.95,-2.81 h0.2
  text "B83" at 42.45,3.29 h0.2
  text "B29" at 15.45,3.29 h0.2
  text "B82" at 41.95,3.29 h0.2
  text "B30" at 15.95,3.29 h0.2
  text "B19" at 10.45,3.29 h0.2
  text "B20" at 10.95,3.29 h0.2
  text "B21" at 11.45,3.29 h0.2
  text "B22" at 11.95,3.29 h0.2
  text "B11" at 6.45,3.29 h0.2
  text "B12" at 6.95,3.29 h0.2
  text "B80" at 40.95,3.29 h0.2
  text "A82" at 41.95,-2.81 h0.2
  text "A83" at 42.45,-2.81 h0.2
Mechanical 9:
  lines w0.025: -2.35,-3.65 -2.35,3.65 46.75,3.65 46.75,-3.65 -2.35,-3.65
3D body "CN1.stp": height 3.2, standoff -0.6, extent -2.35,-3.65 46.75,3.65

## HDMI-A-19P [mm]
pads (23):
  oval 0.28x2.6 smd: 1(11.75,0.76) 2(11.25,0.76) 3(10.75,0.76) 4(10.25,0.76) 5(9.75,0.76) 6(9.25,0.76) 7(8.75,0.76) 8(8.25,0.76) 9(7.75,0.76) 10(7.25,0.76) 11(6.75,0.76) 12(6.25,0.76) 13(5.75,0.76) 14(5.25,0.76) 15(4.75,0.76) 16(4.25,0.76) 17(3.75,0.76) 18(3.25,0.76) 19(2.75,0.76)
  oval 1.5x3.3 hole 0.9 slot 2.9 at 90 deg: 20(0,0) 21(14.5,0)
  oval 1.5x2.3 hole 0.9 slot 1.9 at 90 deg: 22(14.5,-5.96) 23(0,-5.96)
Top Overlay:
  lines w0.15: 0,-7.696 0,-9.568 14.5,-9.568 14.5,-7.696 ; 0,-4.394 0,-2.311 ; 14.5,-4.394 14.5,-2.311
3D body "1747981-1.stp": height 6.13, standoff -2.15, extent -0.229,-10.343 14.772,1.657

## HDMI-SMD_A71-05H4-111N1 [mm]
pads (23):
  rect 0.2x1.2 smd paste-100 mask+0.05: 1(3.6,2.825) 2(3.2,2.825) 3(2.8,2.825) 4(2.4,2.825) 5(2,2.825) 6(1.6,2.825) 7(1.2,2.825) 8(0.8,2.825) 9(0.4,2.825) 10(0,2.825) 11(-0.4,2.825) 12(-0.8,2.825) 13(-1.2,2.825) 14(-1.6,2.825) 15(-2,2.825) 16(-2.4,2.825) 17(-2.8,2.825) 18(-3.2,2.825) 19(-3.6,2.825)
  oval 1.1x2 hole 0.7 slot 1.5 at 90 deg paste+0 mask+0.05: 20(-5.425,1.675) 21(5.425,1.675)
  oval 1.1x1.8 hole 0.7 slot 1.3 at 90 deg paste+0 mask+0.05: 22(-5.425,-2.825) 23(5.425,-2.825)
Top Overlay:
  lines w0.254: -5.6,-4.036 -5.6,-4.825 5.6,-4.825 5.6,-4.036 ; -5.6,-1.614 -5.6,0.464 ; -5.034,2.8 -3.946,2.8 ; 3.946,2.8 5.034,2.8 ; 5.6,-1.614 5.6,0.464
Top Paste:
  drawing of 23 lines, arcs and shapes, not listed
Keep-Out Layer:
  circle w0.003: c3.753,0.875 r0.5
  circle w0.003: c-3.75,0.875 r0.5
  region: 4.253,0.875 4.253,0.775 4.177,0.592 4.036,0.451 3.853,0.375 3.654,0.375 3.47,0.451 3.329,0.592 3.253,0.775 3.253,0.875 3.253,0.974 3.329,1.158 3.47,1.299 3.654,1.375 3.853,1.375 4.036,1.299 4.177,1.158 4.253,0.974 4.253,0.875
  region: 4.253,0.875 4.253,0.775 4.177,0.592 4.036,0.451 3.853,0.375 3.654,0.375 3.47,0.451 3.329,0.592 3.253,0.775 3.253,0.875 3.253,0.974 3.329,1.158 3.47,1.299 3.654,1.375 3.853,1.375 4.036,1.299 4.177,1.158 4.253,0.974 4.253,0.875
  region: -3.25,0.875 -3.25,0.775 -3.326,0.592 -3.467,0.451 -3.651,0.375 -3.85,0.375 -4.033,0.451 -4.174,0.592 -4.25,0.775 -4.25,0.875 -4.25,0.974 -4.174,1.158 -4.033,1.299 -3.85,1.375 -3.651,1.375 -3.467,1.299 -3.326,1.158 -3.25,0.974 -3.25,0.875
  region: -3.25,0.875 -3.25,0.775 -3.326,0.592 -3.467,0.451 -3.651,0.375 -3.85,0.375 -4.033,0.451 -4.174,0.592 -4.25,0.775 -4.25,0.875 -4.25,0.974 -4.174,1.158 -4.033,1.299 -3.85,1.375 -3.651,1.375 -3.467,1.299 -3.326,1.158 -3.25,0.974 -3.25,0.875
Mechanical 1:
  circle w0.003: c3.753,0.875 r0.5
  circle w0.003: c-3.75,0.875 r0.5
Mechanical 5:
  lines w0.051: -5.6,-4.825 -5.6,2.675 5.6,2.675 5.6,-4.825 -5.6,-4.825
Mechanical 7:
  region: 6.035,3.425 6.035,3.4 6,3.365 5.95,3.365 5.915,3.4 5.915,3.425 5.915,3.45 5.95,3.485 6,3.485 6.035,3.45 6.035,3.425
Mechanical 8:
  region: -5.6,-2.425 -5.25,-2.425 -5.25,-3.225 -5.6,-3.225
  region: 5.25,-2.425 5.6,-2.425 5.6,-3.225 5.25,-3.225
  region: 5.25,2.175 5.6,2.175 5.6,1.175 5.25,1.175
  region: -5.6,2.175 -5.25,2.175 -5.25,1.175 -5.6,1.175
  region: -3.675,3.175 -3.525,3.175 -3.525,2.375 -3.675,2.375
  region: -3.275,3.175 -3.125,3.175 -3.125,2.375 -3.275,2.375
  region: -2.875,3.175 -2.725,3.175 -2.725,2.375 -2.875,2.375
  region: -2.475,3.175 -2.325,3.175 -2.325,2.375 -2.475,2.375
  region: -2.075,3.175 -1.925,3.175 -1.925,2.375 -2.075,2.375
  region: -1.675,3.175 -1.525,3.175 -1.525,2.375 -1.675,2.375
  region: -1.275,3.175 -1.125,3.175 -1.125,2.375 -1.275,2.375
  region: -0.875,3.175 -0.725,3.175 -0.725,2.375 -0.875,2.375
  region: -0.475,3.175 -0.325,3.175 -0.325,2.375 -0.475,2.375
  region: -0.075,3.175 0.075,3.175 0.075,2.375 -0.075,2.375
  region: 0.325,3.175 0.475,3.175 0.475,2.375 0.325,2.375
  region: 0.725,3.175 0.875,3.175 0.875,2.375 0.725,2.375
  region: 1.125,3.175 1.275,3.175 1.275,2.375 1.125,2.375
  region: 1.525,3.175 1.675,3.175 1.675,2.375 1.525,2.375
  region: 1.925,3.175 2.075,3.175 2.075,2.375 1.925,2.375
  region: 2.325,3.175 2.475,3.175 2.475,2.375 2.325,2.375
  region: 2.725,3.175 2.875,3.175 2.875,2.375 2.725,2.375
  region: 3.125,3.175 3.275,3.175 3.275,2.375 3.125,2.375
  region: 3.525,3.175 3.675,3.175 3.675,2.375 3.525,2.375
3D body "未命名-EasyEDA PCB Model~0OOoHDMI-SMD_A71-05H4-111N1~HDMI-SMD_A71-05H4-111N1~KFcc021.step": height 3.31, standoff -0.95, extent -5.6,-4.9 5.6,3.1

## HDMI-SMD_GT-HD005A-CGNG0-1 [mm]
pads (23):
  rect 0.18x1.3 smd paste-100 mask+0.05: 1(3.61,2.996) 2(3.21,2.996) 3(2.81,2.996) 4(2.41,2.996) 5(2.01,2.996) 6(1.61,2.996) 7(1.21,2.996) 8(0.81,2.996) 9(0.41,2.996) 10(0.01,2.996) 11(-0.39,2.996) 12(-0.79,2.996) 13(-1.19,2.996) 14(-1.59,2.996) 15(-1.99,2.996) 16(-2.39,2.996) 17(-2.79,2.996) 18(-3.19,2.996) 19(-3.59,2.996)
  oval 1.25x2 hole 0.65 slot 1.4 at 90 deg copper offset 0,0 paste+0 mask+0.05: 20(-5.425,1.504) 23(5.425,1.504)
  oval 1.25x1.8 hole 0.65 slot 1.2 at 90 deg paste+0 mask+0.05: 21(-5.425,-2.996)
  oval 1.25x1.8 hole 0.65 slot 1.2 at 90 deg copper offset 0,0 paste+0 mask+0.05: 22(5.425,-2.996)
Top Overlay:
  lines w0.254: -5.58,-4.113 -5.58,-4.5 -5.073,-4.5 ; -5.58,-1.879 -5.58,0.287 ; -5.58,2.721 -5.58,3.49 -3.961,3.49 ; -5.073,-4.496 5.073,-4.496 5.077,-4.5 5.6,-4.5 5.6,-4.109 ; -3.43,-2.83 -3.43,-1.07 -2.36,-1.07 -2.35,-2.83 ; 2.43,-2.83 2.43,-1.07 3.5,-1.07 3.51,-2.83 ; 3.981,3.49 5.6,3.49 5.6,2.717 ; 5.6,-1.883 5.6,0.291
Top Paste:
  drawing of 23 lines, arcs and shapes, not listed
Keep-Out Layer:
  circle w0.003: c3.726,0.68 r0.5
  circle w0.003: c-3.774,0.68 r0.5
  region: 4.226,0.68 4.226,0.581 4.15,0.397 4.009,0.256 3.826,0.18 3.627,0.18 3.443,0.256 3.302,0.397 3.226,0.581 3.226,0.68 3.226,0.78 3.302,0.963 3.443,1.104 3.627,1.18 3.826,1.18 4.009,1.104 4.15,0.963 4.226,0.78 4.226,0.68
  region: 4.226,0.68 4.226,0.581 4.15,0.397 4.009,0.256 3.826,0.18 3.627,0.18 3.443,0.256 3.302,0.397 3.226,0.581 3.226,0.68 3.226,0.78 3.302,0.963 3.443,1.104 3.627,1.18 3.826,1.18 4.009,1.104 4.15,0.963 4.226,0.78 4.226,0.68
  region: -3.274,0.68 -3.274,0.581 -3.35,0.397 -3.491,0.256 -3.675,0.18 -3.874,0.18 -4.057,0.256 -4.198,0.397 -4.274,0.581 -4.274,0.68 -4.274,0.78 -4.198,0.963 -4.057,1.104 -3.874,1.18 -3.675,1.18 -3.491,1.104 -3.35,0.963 -3.274,0.78 -3.274,0.68
  region: -3.274,0.68 -3.274,0.581 -3.35,0.397 -3.491,0.256 -3.675,0.18 -3.874,0.18 -4.057,0.256 -4.198,0.397 -4.274,0.581 -4.274,0.68 -4.274,0.78 -4.198,0.963 -4.057,1.104 -3.874,1.18 -3.675,1.18 -3.491,1.104 -3.35,0.963 -3.274,0.78 -3.274,0.68
Mechanical 1:
  circle w0.003: c3.726,0.68 r0.5
  circle w0.003: c-3.774,0.68 r0.5
Mechanical 2:
  circle w0.5: c-3.774,0.68 r0.25
  circle w0.5: c3.774,0.68 r0.25
  region: -3.567,-2.82 -3.567,-1.06 -3.567,-1.035 -3.548,-0.988 -3.512,-0.952 -3.465,-0.933 -3.44,-0.933 -2.37,-0.933 -2.345,-0.933 -2.298,-0.952 -2.263,-0.988 -2.243,-1.034 -2.243,-1.059 -2.233,-2.819 -2.233,-2.872 -2.307,-2.947 -2.412,-2.947 -2.487,-2.873 -2.487,-2.821 -2.496,-1.187 -3.313,-1.187 -3.313,-2.82 -3.313,-2.873 -3.388,-2.947 -3.493,-2.947 -3.567,-2.873 -3.567,-2.82
  region: 2.323,-2.83 2.323,-1.07 2.323,-1.045 2.342,-0.998 2.378,-0.962 2.425,-0.943 2.45,-0.943 3.52,-0.943 3.545,-0.943 3.592,-0.962 3.627,-0.998 3.647,-1.044 3.647,-1.069 3.657,-2.829 3.657,-2.882 3.583,-2.957 3.478,-2.957 3.403,-2.883 3.403,-2.831 3.394,-1.197 2.577,-1.197 2.577,-2.83 2.577,-2.883 2.502,-2.957 2.397,-2.957 2.323,-2.883 2.323,-2.83
Mechanical 5:
  lines w0.051: -5.58,-4.5 5.6,-4.5 5.6,3.49 -5.58,3.49 -5.58,-4.5
Mechanical 7:
  region: 5.66,3.496 5.66,3.471 5.625,3.436 5.575,3.436 5.54,3.471 5.54,3.496 5.54,3.521 5.575,3.556 5.625,3.556 5.66,3.521 5.66,3.496
Mechanical 8:
  region: -5.575,-2.596 -5.275,-2.596 -5.275,-3.396 -5.575,-3.396
  region: 5.275,-2.596 5.575,-2.596 5.575,-3.396 5.275,-3.396
  region: -5.575,2.004 -5.275,2.004 -5.275,1.004 -5.575,1.004
  region: 5.275,2.004 5.575,2.004 5.575,1.004 5.275,1.004
  region: -3.68,3.496 -3.5,3.496 -3.5,2.496 -3.68,2.496
  region: -3.28,3.496 -3.1,3.496 -3.1,2.496 -3.28,2.496
  region: -2.88,3.496 -2.7,3.496 -2.7,2.496 -2.88,2.496
  region: -2.48,3.496 -2.3,3.496 -2.3,2.496 -2.48,2.496
  region: -2.08,3.496 -1.9,3.496 -1.9,2.496 -2.08,2.496
  region: -1.68,3.496 -1.5,3.496 -1.5,2.496 -1.68,2.496
  region: -1.28,3.496 -1.1,3.496 -1.1,2.496 -1.28,2.496
  region: -0.88,3.496 -0.7,3.496 -0.7,2.496 -0.88,2.496
  region: -0.48,3.496 -0.3,3.496 -0.3,2.496 -0.48,2.496
  region: -0.08,3.496 0.1,3.496 0.1,2.496 -0.08,2.496
  region: 0.32,3.496 0.5,3.496 0.5,2.496 0.32,2.496
  region: 0.72,3.496 0.9,3.496 0.9,2.496 0.72,2.496
  region: 1.12,3.496 1.3,3.496 1.3,2.496 1.12,2.496
  region: 1.52,3.496 1.7,3.496 1.7,2.496 1.52,2.496
  region: 1.92,3.496 2.1,3.496 2.1,2.496 1.92,2.496
  region: 2.32,3.496 2.5,3.496 2.5,2.496 2.32,2.496
  region: 2.72,3.496 2.9,3.496 2.9,2.496 2.72,2.496
  region: 3.12,3.496 3.3,3.496 3.3,2.496 3.12,2.496
  region: 3.52,3.496 3.7,3.496 3.7,2.496 3.52,2.496
3D body "1.step": height 3.34, standoff -0.96, extent -5.6,-4.969 5.6,3.031

## HDMI-SMD_HDM4PB-21BM4RN15 [mm]
pads (24):
  rect 0.3x1.7 smd: 0(4.71,2.875) 0(5.21,2.875) 1(4.21,2.875) 2(3.71,2.875) 3(3.21,2.875) 4(2.71,2.875) 5(2.21,2.875) 6(1.71,2.875) 7(1.21,2.875) 8(0.71,2.875) 9(0.21,2.875) 10(-0.29,2.875) 11(-0.79,2.875) 12(-1.29,2.875) 13(-1.79,2.875) 14(-2.29,2.875) 15(-2.79,2.875) 16(-3.29,2.875) 17(-3.79,2.875) 18(-4.29,2.875) 19(-4.79,2.875)
  round 2 hole 1.3: 20(7.25,0.425) 21(-7.25,0.425) 22(0,-2.875)
Top Overlay:
  lines w0.254: -7.366,-0.801 -7.366,-3.52 -1.048,-3.52 ; -7.366,1.651 -7.366,2.957 -5.207,2.957 ; -5.334,2.957 -5.171,2.957 ; 1.048,-3.52 7.366,-3.52 7.366,-0.801 ; 5.591,2.957 7.366,2.957 7.366,1.651
3D body "CN1.stp": height 13, standoff -2.7, extent -7.499,-3.094 7.499,3.206